# Altium schematic symbol library diffuser_pic_and_place.SchLib: 21 symbols
Pins are listed as number, name and electrical type; pins without a type are passive.

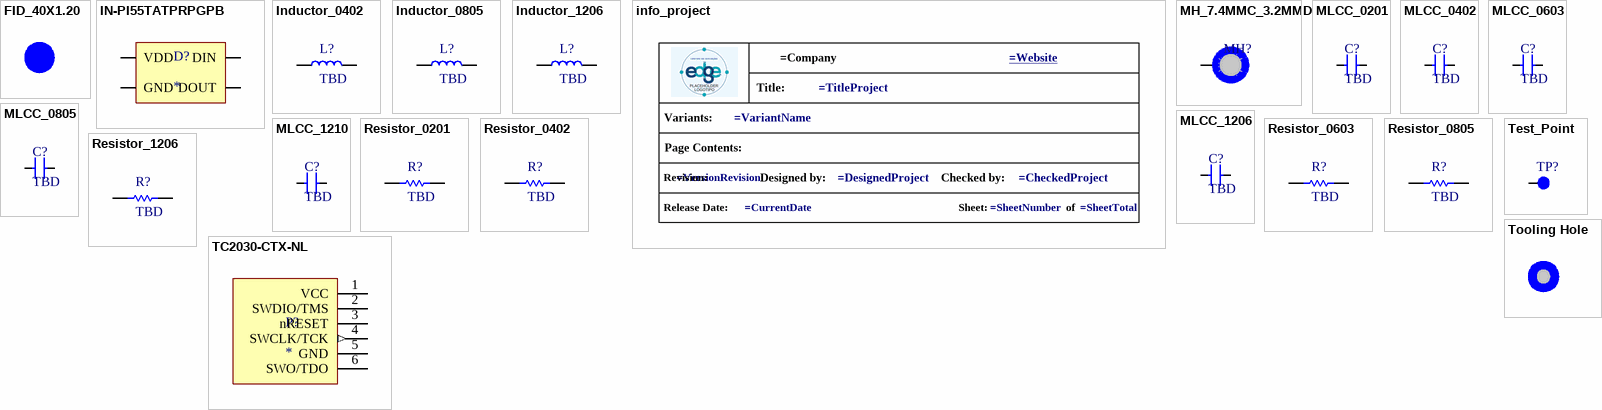
[diagram p0: symbols FID_40X1.20 to Tooling Hole]

## FID_40X1.20
designator FID?  (value not drawn)  (no BOM)
Fiducials
footprint FID_40X1.20

## IN-PI55TATPRPGPB
designator D?
ADDRESS LED DISCRETE SERIAL RGB; Manufacturer: Inolux; Manufacturer Part Number: IN-PI55TATPRPGPB; Color: Blue, Green, Red; Forward Current: 12mA; Max Supply Voltage: 5.5V; Min Supply Voltage: 3.5V; Number of Circuits: 1; Shape: Round; Supplier: DigiKey; Supplier Part Number: 1830-1204-6-ND; RoHS: Compliant; Category: LEDs; Stock: 306714; Pricing: 1=0,58, 10=0,398, 100=0,2865, 500=0,23652 (USD); China RoHS: Compliant; Height: 1.6mm; Harmonized Tariff Schedule (HTS) Code: 8541.40.20.00; Max Operating Temperature: 85°C; Min Operating Temperature: -45°C; Mounting Technology: Surface Mount; Number of Terminals: 4; Packaging: Bulk; REACH SVHC: Unaffected; Schedule B: 8541402000, 8541402000|8541402000|8541402000|8541402000|8541402000; Terminal Pitch: 3.2mm; ComponentLink1URL: https://datasheet.octopart.com:443/IN-PI55TATPRPGPB-Inolux-datasheet-145013293.pdf?src-supplier=IHS; ComponentLink1Description: https://datasheet.octopart.com:443/IN-PI55TATPRPGPB-Inolux-datasheet-145013293.pdf?src-supplier=IHS
footprint LED_WS2812B-B
pins: 1 VDD, 2 DOUT, 3 GND, 4 DIN

## Inductor_0402
designator L?, comment TBD
INDUCTOR - TBD 0402
footprint L0402
pins: 1, 2

## Inductor_0805
designator L?, comment TBD
INDUCTOR - TBD 0805
footprint L0805
pins: 1, 2

## Inductor_1206
designator L?, comment TBD
INDUCTOR - TBD 1206
footprint L1206 (Chip Capacitor, 2-Leads, Body 3.20x1.60mm, IPC Medium Density)
pins: 1, 2

## info_project
designator GPH?  (value not drawn)  (graphical)
GRAPHICAL - Info Project
text: Title:; Variants:; Page Contents:; Revision:; Designed by:; Checked by:; Release Date:; Sheet:; of

## MH_7.4MMC_3.2MMD
designator MH?  (value not drawn)  (no BOM)
Mounting Hole 7.4mm Diameter 3.2mm Drill
footprint MH_7.4MMC_3.2MMD
pins: 1

## MLCC_0201
designator C?, comment TBD
MLCC - TBD 0201
footprint C0201
pins: 1, 2

## MLCC_0402
designator C?, comment TBD
MLCC - TBD 0402
footprint C0402
pins: 1, 2

## MLCC_0603
designator C?, comment TBD
MLCC - TBD 0603
footprint C0603
pins: 1, 2

## MLCC_0805
designator C?, comment TBD
MLCC - TBD 0805
footprint C0805
pins: 1, 2

## MLCC_1206
designator C?, comment TBD
MLCC - TBD 1206
footprint C1206 (Chip Capacitor, 2-Leads, Body 3.20x1.60mm, IPC Medium Density)
pins: 1, 2

## MLCC_1210
designator C?, comment TBD
MLCC - TBD 1210
footprint C1210
pins: 1, 2

## Resistor_0201
designator R?, comment TBD
Resistor - TBD 0201
footprint R0201
pins: 1, 2

## Resistor_0402
designator R?, comment TBD
Resistor - TBD 0402
footprint R0402
pins: 1, 2

## Resistor_0603
designator R?, comment TBD
Resistor - TBD 0603
footprint R0603
pins: 1, 2

## Resistor_0805
designator R?, comment TBD
Resistor - TBD 0805
footprint R0805
pins: 1, 2

## Resistor_1206
designator R?, comment TBD
Resistor - TBD 1206
footprint R1206
pins: 1, 2

## TC2030-CTX-NL
designator P?  (no BOM)
6 pin Tag-Connect; .SCHChecked: Alex Batista; .PCBChecked: Alex Batista
footprint TC2030-CTX-NL
pins: 1 VCC, 2 SWDIO/TMS, 3 nRESET, 4 SWCLK/TCK (out), 5 GND, 6 SWO/TDO

## Test_Point
designator TP?, comment TestPoint  (value not drawn)  (no BOM)
MECH - Test Points
footprint Test Point
pins: 1

## Tooling Hole
designator TH?  (value not drawn)  (no BOM)
MECH - Tooling Holes
footprint Tooling Hole